# Altium footprint library NXE2S0505MC-R13.PcbLib: 1 footprints
Each footprint in its own frame and in the unit in brackets; x right, y up, seen from the top. Pads: shape width x height; smd on the part's side, far side on the other; paste and mask are expansions set on the pad; w line width, h text height; cw(c..) or ccw(c..) is an arc to the next point about the centre after c.
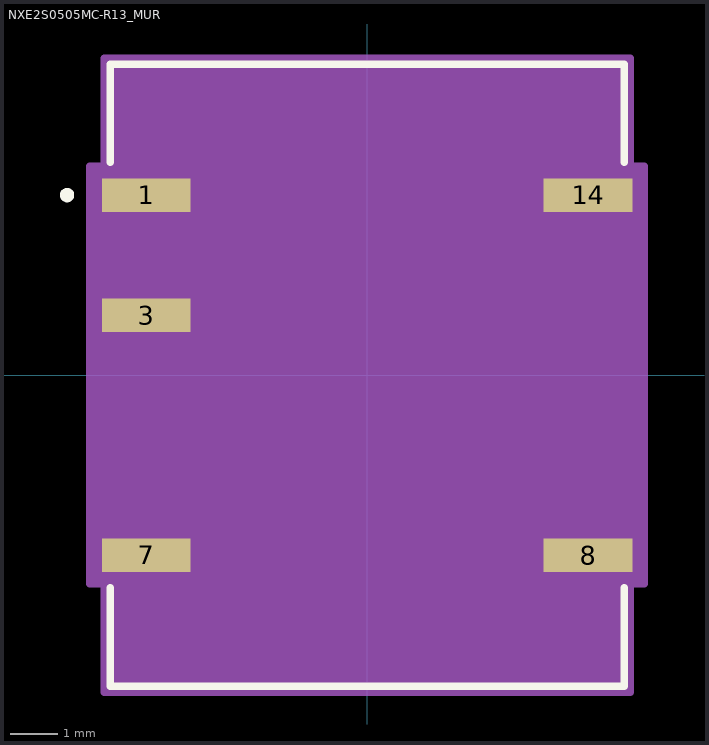
[diagram p0: the footprint, top view; thin cyan lines are the x and y axes]

## NXE2S0505MC-R13_MUR [mil]
pads (5):
  rect 74x28 smd paste+0 mask+0: 1(-184,150) 3(-184,50) 7(-184,-150) 8(184,-150) 14(184,150)
Top Overlay:
  circle w6: c-250,150 r3
  lines w6: -214,-177.1 -214,-259 214,-259 214,-177.1 ; -214,177.1 -214,259 214,259 214,177.1
  text ".Designator" at -137.5,-25 h50
Mechanical 13:
  circle w6: c-147,150 r0
  lines w1: -12,254 ccw(c0,254) 12,254 ; -209,-254 209,-254 209,254 -209,254 -209,-254
  text ".Designator" at -137.5,-25 h50
Mechanical 15:
  region: -219,-174 -231,-174 -231,174 -219,174 -219,264 219,264 219,174 231,174 231,-174 219,-174 219,-264 -219,-264
  lines w6: -231,-174 -231,174 -219,174 -219,264 219,264 219,174 231,174 231,-174 219,-174 219,-264 -219,-264 -219,-174 -231,-174